# Altium schematic symbol library 1776275-5.SchLib: 1 symbol
Pins are listed as number, name and electrical type; pins without a type are passive.

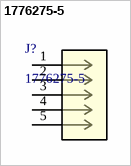
[diagram p0: symbol 1776275-5]

## 1776275-5
designator J?
5P TB ,90deg,VT,3.5mm,Blue,w/interlock; Manufacturer_Name: TE Connectivity; TYPE: Receptacle; Copyright: Copyright (C) 2025 Ultra Librarian. All rights reserved.; Manufacturer_Part_Number: 1776275-5; RefDes: RefDes
footprint CONN5_1776275-5 (Footprint not found)
pins: 1, 2, 3, 4, 5